# Altium footprint library PCB_V2.PcbLib: 86 footprints (part 3 of 6)
Each footprint in its own frame and in the unit in brackets; x right, y up, seen from the top. Pads: shape width x height; smd on the part's side, far side on the other; paste and mask are expansions set on the pad; w line width, h text height; cw(c..) or ccw(c..) is an arc to the next point about the centre after c.
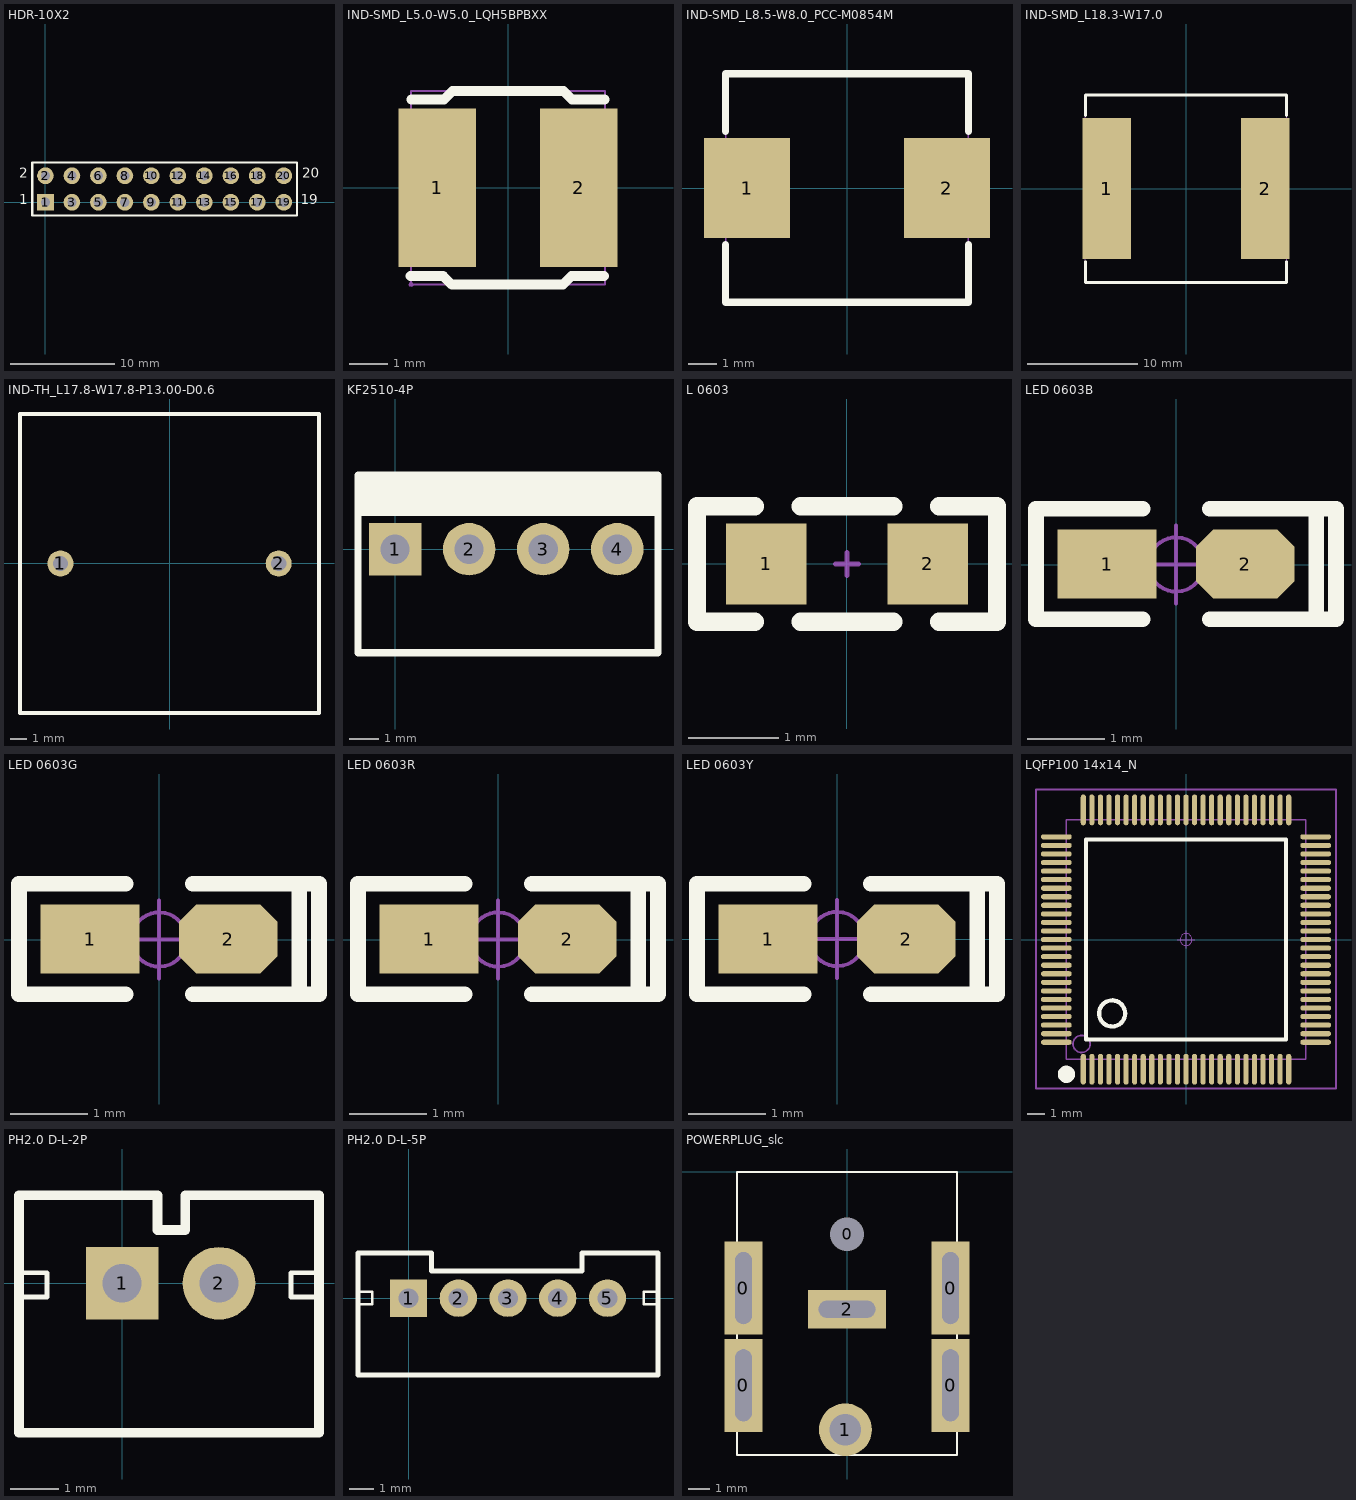
[diagram p2: the footprints below, top view; thin cyan lines are the x and y axes]

## HDR-10X2 [mm]
pads (20):
  rect 1.6x1.6 hole 0.9: 1(0,0)
  round 1.6 hole 0.9: 2(0,2.54) 3(2.54,0) 4(2.54,2.54) 5(5.08,0) 6(5.08,2.54) 7(7.62,0) 8(7.62,2.54) 9(10.16,0) 10(10.16,2.54) 11(12.7,0) 12(12.7,2.54) 13(15.24,0) 14(15.24,2.54) 15(17.78,0) 16(17.78,2.54) 17(20.32,0) 18(20.32,2.54) 19(22.86,0) 20(22.86,2.54)
Top Overlay:
  lines w0.2: -1.27,-1.27 24.13,-1.27 24.13,3.81 -1.27,3.81 -1.27,-1.27
  text "20" at 24.638,2.032 h1.6
  text "19" at 24.511,-0.508 h1.6
  text "15" at 19.812,-0.762 h1.02
  text "16" at 19.812,2.286 h1.02
  text "1" at -2.54,-0.508 h1.6
  text "2" at -2.54,2.032 h1.6
Bottom Overlay:
  lines w0.2: -1.27,-1.27 24.13,-1.27 24.13,3.81 -1.27,3.81 -1.27,-1.27
3D body: height 8.5, standoff -3, extent 19.05,-1.27 21.59,3.81
3D body: height 8.5, standoff -3, extent 16.51,-1.27 19.05,3.81
3D body: height 8.5, standoff -3, extent 21.59,-1.27 24.13,3.81
3D body: height 8.5, standoff -3, extent 16.51,-1.27 19.05,3.81
3D body: height 8.5, standoff -3, extent 11.43,-1.27 13.97,3.81
3D body: height 8.5, standoff -3, extent 13.97,-1.27 16.51,3.81
3D body: height 8.5, standoff -3, extent 3.81,-1.27 6.35,3.81
3D body: height 8.5, standoff -3, extent 6.35,-1.27 8.89,3.81
3D body: height 8.5, standoff -3, extent -1.27,-1.27 1.27,3.81
3D body: height 8.5, standoff -3, extent 1.27,-1.27 3.81,3.81
3D body: height 8.5, standoff -3, extent 8.89,-1.27 11.43,3.81

## IND-SMD_L5.0-W5.0_LQH5BPBXX [mm]
pads (2):
  rect 2x4.1 smd: 1(-1.825,0) 2(1.825,0)
Top Overlay:
  lines w0.254: -2.518,-2.28 -1.675,-2.28 -1.455,-2.5 -0.016,-2.5 ; -2.5,2.28 -1.657,2.28 -1.437,2.5 0.002,2.5 ; -0.02,-2.5 1.419,-2.5 1.639,-2.28 2.482,-2.28 ; -0.002,2.5 1.437,2.5 1.657,2.28 2.5,2.28
Mechanical 15:
  region: -2.5,2 -1,2 -1,-2 -2.5,-2
  region: 1,2 2.5,2 2.5,-2 1,-2
  region: -2.436,-2.5 -2.454,-2.456 -2.5,-2.437 -2.546,-2.456 -2.564,-2.5 -2.546,-2.544 -2.5,-2.563 -2.454,-2.544
  lines w0.051: -2.5,-2.5 2.5,-2.5 2.5,2.5 -2.5,2.5 -2.5,-2.5

## IND-SMD_L8.5-W8.0_PCC-M0854M [mm]
pads (2):
  rect 3x3.5 smd: 1(-3.5,0) 2(3.5,0)
Top Overlay:
  lines w0.254: -4.25,-1.981 -4.25,-4 4.25,-4 4.25,-1.981 ; -4.25,1.981 -4.25,4 4.25,4 4.25,1.981
Mechanical 15:
  region: -4.185,-4 -4.204,-3.954 -4.25,-3.935 -4.296,-3.954 -4.315,-4 -4.296,-4.046 -4.25,-4.065 -4.204,-4.046 -4.185,-4
  region: 2.45,1.5 4.25,1.5 4.25,-1.5 2.45,-1.5
  region: -4.25,1.5 -2.45,1.5 -2.45,-1.5 -4.25,-1.5
  lines w0.051: -4.25,-4 -4.25,4 4.25,4 4.25,-4 -4.25,-4

## IND-SMD_L18.3-W17.0 [mm]
pads (2):
  rect 4.4x12.8 smd: 1(-7.2,0) 2(7.2,0)
Top Overlay:
  lines w0.254: -9.125,-6.631 -9.125,-8.5 9.125,-8.5 9.125,-6.631 ; -9.125,6.631 -9.125,8.5 9.099,8.5 9.099,8.486 ; 9.125,6.631 9.125,8.5
Mechanical 15:
  region: -8.935,-8.5 -8.954,-8.454 -9,-8.435 -9.046,-8.454 -9.065,-8.5 -9.046,-8.546 -9,-8.565 -8.954,-8.546 -8.935,-8.5
  region: 5.825,6 9.125,6 9.125,-6 5.825,-6
  region: -9.125,6 -5.825,6 -5.825,-6 -9.125,-6
  lines w0.051: -9.125,-8.5 -9.125,8.5 9.125,8.5 9.125,-8.5 -9.125,-8.5

## IND-TH_L17.8-W17.8-P13.00-D0.6 [mm]
pads (2):
  round 1.55 hole 0.9 paste+0 mask+0.05: 1(-6.5,0) 2(6.5,0)
Top Overlay:
  lines w0.254: -8.9,-8.9 8.9,-8.9 8.9,8.9 -8.9,8.9 -8.9,-8.9
Mechanical 15:
  region: -6.195,0 -6.217,0.111 -6.284,0.211 -6.383,0.277 -6.5,0.3 -6.617,0.277 -6.716,0.211 -6.783,0.111 -6.805,0 -6.783,-0.111 -6.716,-0.21 -6.617,-0.277 -6.5,-0.3 -6.383,-0.277 -6.284,-0.21 -6.217,-0.111
  region: 6.805,0 6.783,0.111 6.716,0.211 6.617,0.277 6.5,0.3 6.383,0.277 6.284,0.211 6.217,0.111 6.195,0 6.217,-0.111 6.284,-0.21 6.383,-0.277 6.5,-0.3 6.617,-0.277 6.716,-0.21 6.783,-0.111
  region: -8.835,-8.9 -8.854,-8.854 -8.9,-8.835 -8.946,-8.854 -8.965,-8.9 -8.946,-8.946 -8.9,-8.965 -8.854,-8.946 -8.835,-8.9
  lines w0.051: -8.9,-8.9 8.9,-8.9 8.9,8.9 -8.9,8.9 -8.9,-8.9

## KF2510-4P [mm]
pads (4):
  rect 1.8x1.8 hole 1: 1(0,0)
  round 1.8 hole 1: 2(2.54,0) 3(5.08,0) 4(7.62,0)
Top Overlay:
  rectangle: -1.27,1.27 9.017,2.54
  lines w0.254: -1.27,1.27 9.017,1.27 ; -1.27,-3.556 9.017,-3.556 9.017,2.54 -1.27,2.54 -1.27,-3.556
3D body: height 11.05, standoff -2.95, extent 6.35,-3.5 8.89,2.4
3D body: height 11.05, standoff -2.95, extent -1.27,-3.5 1.27,2.4
3D body: height 11.05, standoff -2.95, extent 3.81,-3.5 6.35,2.4
3D body: height 11.05, standoff -2.95, extent 1.27,-3.5 3.81,2.4

## L 0603 [mil] "小功率"
pads (2):
  rect 35x35 smd: 1(-35,0) 2(35,0)
Top Overlay:
  lines w8: -40,-25 -65,-25 -65,25 -40,25 ; -20,-25 20,-25 ; -20,25 20,25 ; 40,-25 65,-25 65,25 40,25
Mechanical 15:
  lines w2: -5,0 5,0 ; 0,-5 0,0 0,5
3D body: height 31.5, standoff -0.11, extent -31.5,-15.75 31.5,15.75

## LED 0603B [mil] "蓝色0603"
pads (2):
  rect 50x35 smd: 1(-35,0.26)
  oct 50x35 smd: 2(35,0.26)
Top Overlay:
  lines w8: -17,-27.74 -71,-27.74 -71,-25.74 -71,28.26 -70,28.26 -17,28.26 ; 17,-27.74 70,-27.74 ; 17,28.26 71,28.26 81,28.26 81,-27.74 71,-27.74 71,26.26
Mechanical 15:
  circle w1.97: c0,0 r13.78
  lines w1.97: -19.68,0 19.68,0 ; 0,-19.68 0,19.68
3D body: height 23.82, standoff 8.07, extent -23.58,-15.79 23.58,15.79
3D body: height 18.36, standoff -0.16, extent -31.49,-15.79 31.5,15.79

## LED 0603G [mil] "绿色0603"
pads (2):
  rect 50x35 smd: 1(-35,0.26)
  oct 50x35 smd: 2(35,0.26)
Top Overlay:
  lines w8: -17,-27.74 -71,-27.74 -71,-25.74 -71,28.26 -70,28.26 -17,28.26 ; 17,-27.74 70,-27.74 ; 17,28.26 71,28.26 81,28.26 81,-27.74 71,-27.74 71,26.26
Mechanical 15:
  circle w1.97: c0,0 r13.78
  lines w1.97: -19.68,0 19.68,0 ; 0,-19.68 0,19.68
3D body: height 18.36, standoff -0.16, extent -31.49,-15.79 31.5,15.79
3D body: height 23.82, standoff 8.07, extent -23.58,-15.79 23.58,15.79

## LED 0603R [mil] "红色0603"
pads (2):
  rect 50x35 smd: 1(-35,0.26)
  oct 50x35 smd: 2(35,0.26)
Top Overlay:
  lines w8: -17,-27.74 -71,-27.74 -71,-25.74 -71,28.26 -70,28.26 -17,28.26 ; 17,-27.74 70,-27.74 ; 17,28.26 71,28.26 81,28.26 81,-27.74 71,-27.74 71,26.26
Mechanical 15:
  circle w1.97: c0,0 r13.78
  lines w1.97: -19.68,0 19.68,0 ; 0,-19.68 0,19.68
3D body: height 23.82, standoff 8.07, extent -23.58,-15.79 23.58,15.79

## LED 0603Y [mil] "黄色0603"
pads (2):
  rect 50x35 smd: 1(-35,0)
  oct 50x35 smd: 2(35,0)
Top Overlay:
  lines w8: -17,-28 -71,-28 -71,-26 -71,28 -70,28 -17,28 ; 17,-28 70,-28 ; 17,28 71,28 81,28 81,-28 71,-28 71,26
Mechanical 15:
  circle w1.97: c0,0 r13.78
  lines w1.97: -19.68,0 19.68,0 ; 0,-19.68 0,19.68
3D body: height 18.36, standoff -0.16, extent -31.5,-16.04 31.49,15.53
3D body: height 23.82, standoff 8.07, extent -23.58,-15.79 23.58,15.79

## LQFP100 14x14_N [mm] "100脚，体宽14x14mm，脚?"
height 1.6
pads (100):
  oval 0.3x1.8 smd: 1(-6,-7.575) 2(-5.5,-7.575) 3(-5,-7.575) 4(-4.5,-7.575) 5(-4,-7.575) 6(-3.5,-7.575) 7(-3,-7.575) 8(-2.5,-7.575) 9(-2,-7.575) 10(-1.5,-7.575) 11(-1,-7.575) 12(-0.5,-7.575) 13(0,-7.575) 14(0.5,-7.575) 15(1,-7.575) 16(1.5,-7.575) 17(2,-7.575) 18(2.5,-7.575) 19(3,-7.575) 20(3.5,-7.575) 21(4,-7.575) 22(4.5,-7.575) 23(5,-7.575) 24(5.5,-7.575) 25(6,-7.575) 51(6,7.575) 52(5.5,7.575) 53(5,7.575) 54(4.5,7.575) 55(4,7.575) 56(3.5,7.575) 57(3,7.575) 58(2.5,7.575) 59(2,7.575) 60(1.5,7.575) 61(1,7.575) 62(0.5,7.575) 63(0,7.575) 64(-0.5,7.575) 65(-1,7.575) 66(-1.5,7.575) 67(-2,7.575) 68(-2.5,7.575) 69(-3,7.575) 70(-3.5,7.575) 71(-4,7.575) 72(-4.5,7.575) 73(-5,7.575) 74(-5.5,7.575) 75(-6,7.575)
  oval 1.8x0.3 smd: 26(7.576,-6) 27(7.576,-5.5) 28(7.576,-5) 29(7.576,-4.5) 30(7.576,-4) 31(7.576,-3.5) 32(7.576,-3) 33(7.576,-2.5) 34(7.576,-2) 35(7.576,-1.5) 36(7.576,-1) 37(7.576,-0.5) 38(7.576,0) 39(7.576,0.5) 40(7.576,1) 41(7.576,1.5) 42(7.576,2) 43(7.576,2.5) 44(7.576,3) 45(7.576,3.5) 46(7.576,4) 47(7.576,4.5) 48(7.576,5) 49(7.576,5.5) 50(7.576,6) 76(-7.575,6) 77(-7.575,5.5) 78(-7.575,5) 79(-7.575,4.5) 80(-7.575,4) 81(-7.575,3.5) 82(-7.575,3) 83(-7.575,2.5) 84(-7.575,2) 85(-7.575,1.5) 86(-7.575,1) 87(-7.575,0.5) 88(-7.575,0) 89(-7.575,-0.5) 90(-7.575,-1) 91(-7.575,-1.5) 92(-7.575,-2) 93(-7.575,-2.5) 94(-7.575,-3) 95(-7.575,-3.5) 96(-7.575,-4) 97(-7.575,-4.5) 98(-7.575,-5) 99(-7.575,-5.5) 100(-7.575,-6)
Top Overlay:
  circle w0.254: c-4.318,-4.318 r0.762
  circle w0.508: c-6.985,-7.874 r0.25
  lines w0.254: -5.842,-5.842 5.842,-5.842 5.842,5.842 -5.842,5.842 -5.842,-5.842
Mechanical 13:
  circle w0.1: c-6.1,-6.1 r0.5
  lines w0.1: -7,-7 -7,7 7,7 7,-7 -7,-7
Mechanical 15:
  circle w0.05: c0,0 r0.35
  lines w0.05: -0.5,0 0.5,0 ; 0,-0.5 0,0.5
  lines w0.1: -8.763,-8.7 -8.763,8.763 8.763,8.763 8.763,-8.7 -8.763,-8.7
3D body: height 1.45, standoff -0.01, extent -8.003,-8.003 8.003,8.003

## PCBComponent_1 [mm]
3D body: height 3, standoff -13.35, extent -94.016,-32.116 117.984,92.02

## PH2.0 D-L-2P [mm] "?"
height 10
pads (2):
  rect 1.5x1.5 hole 0.8: 1(0,0)
  round 1.5 hole 0.8: 2(2,0)
Top Overlay:
  lines w0.1: -2.128,-0.284 -1.548,-0.284 -1.548,0.216 -2.128,0.216 ; 4.064,-0.284 3.484,-0.284 3.484,0.216 4.064,0.216
  lines w0.2: -2.128,-3.084 -2.128,1.816 ; 0.73,1.816 0.73,1.1 1.302,1.1 1.302,1.816 ; 4.064,-3.084 4.064,1.816
  lines w0.203: -2.128,-3.084 4,-3.084 ; -2.128,1.816 0.73,1.816 ; 1.302,1.816 4,1.816
3D body: height 6.02, standoff -2.98, extent -1.95,-3 3.95,1.7

## PH2.0 D-L-5P [mm] "?"
height 10
pads (5):
  rect 1.5x1.5 hole 0.8: 1(0,0)
  round 1.5 hole 0.8: 2(2,0) 3(4,0) 4(6,0) 5(8,0)
Top Overlay:
  lines w0.1: -2.032,-0.246 -1.452,-0.246 -1.452,0.254 -2.032,0.254 ; 10.032,-0.246 9.452,-0.246 9.452,0.254 10.032,0.254
  lines w0.2: -2.032,1.816 -2.032,-3.084 10.032,-3.084 10.032,1.816 ; 0.92,1.816 0.92,1.1 6.984,1.1 6.984,1.816
  lines w0.203: -2.032,1.816 0.92,1.816 ; 6.984,1.816 10.032,1.816
3D body: height 6.02, standoff -2.98, extent -1.95,-3 9.95,1.7

## POWERPLUG_slc [mm]
pads (7):
  rect 1.8x4.4 hole 0.8 slot 3.4 at 90 deg: 0(-4.9,-10.1) 0(-4.9,-5.5) 0(4.9,-10.1) 0(4.9,-5.5)
  round 1 hole 1.6: 0(0,-2.95)
  round 2.5 hole 1.5: 1(-0.076,-12.2)
  rect 3.7x1.8 hole 0.8 slot 2.7 at 0 deg: 2(0,-6.5)
Top Overlay:
  lines w0.1: -5.2,-13.4 -5.2,0 5.2,0 5.2,-13.4 -5.2,-13.4